# Altium footprint library Footprint_Vlad.PcbLib: 392 footprints (part 16 of 25)
Each footprint in its own frame and in the unit in brackets; x right, y up, seen from the top. Pads: shape width x height; smd on the part's side, far side on the other; paste and mask are expansions set on the pad; w line width, h text height; cw(c..) or ccw(c..) is an arc to the next point about the centre after c.
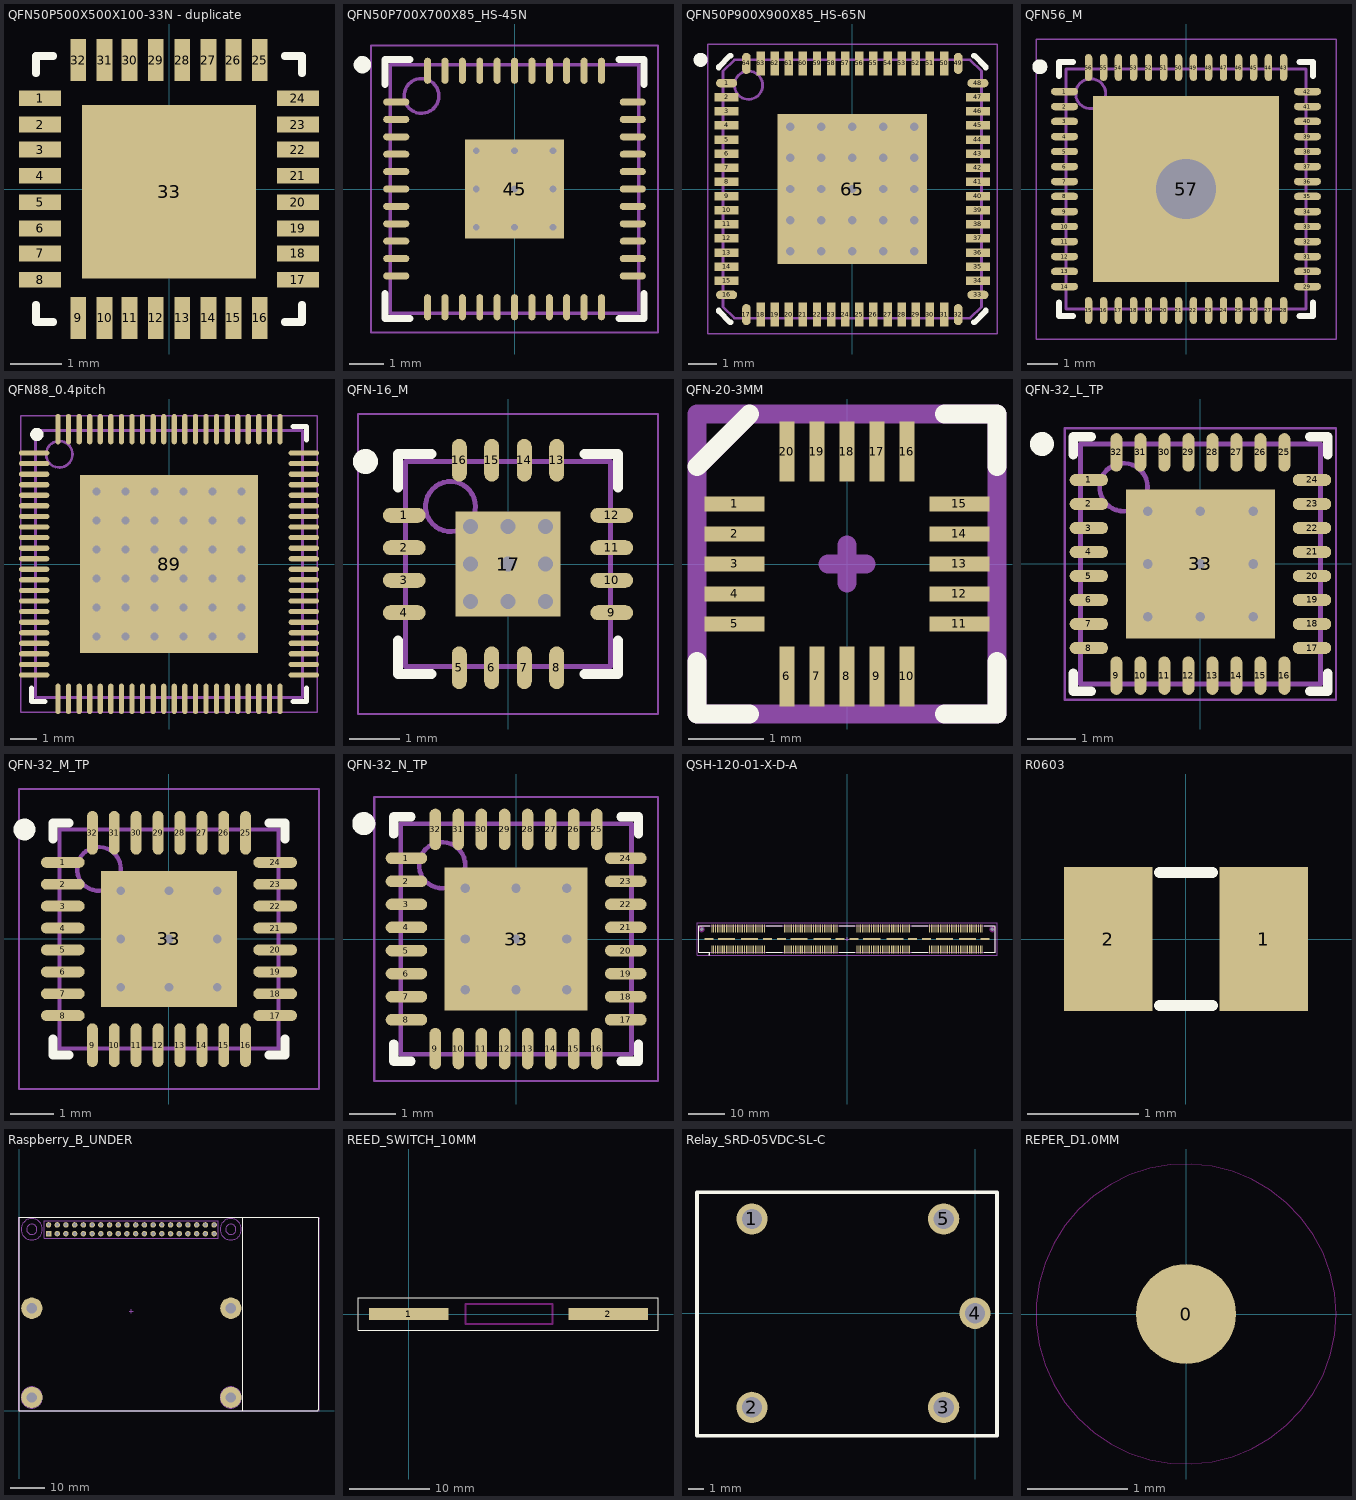
[diagram p15: the footprints below, top view; thin cyan lines are the x and y axes]

## QFN50P500X500X100-33N - duplicate [mil]
pads (33):
  rect 32x12 smd: 1(-98,69) 2(-98,49) 3(-98,30) 4(-98,10) 5(-98,-10) 6(-98,-30) 7(-98,-49) 8(-98,-69) 17(98,-69) 18(98,-49) 19(98,-30) 20(98,-10) 21(98,10) 22(98,30) 23(98,49) 24(98,69)
  rect 12x32 smd: 9(-69,-98) 10(-49,-98) 11(-30,-98) 12(-10,-98) 13(10,-98) 14(30,-98) 15(49,-98) 16(69,-98) 25(69,98) 26(49,98) 27(30,98) 28(10,98) 29(-10,98) 30(-30,98) 31(-49,98) 32(-69,98)
  rect 132x132 smd: 33(0,-2)
Top Overlay:
  lines w6: -101,-88 -101,-101 -88,-101 ; -101,88 -101,101 -88,101 ; 88,-101 101,-101 101,-88 ; 88,101 101,101 101,88

## QFN50P700X700X85_HS-45N [mm] "QFN, 44-Leads, Body 7,00x7,00mm, Pitch 0,50mm, Thermal Pad 2,85x2,85mm, IPC Medium Density"
height 0.85
pads (45):
  oval 0.75x0.2 smd: 1(-3.4,2.5) 2(-3.4,2) 3(-3.4,1.5) 4(-3.4,1) 5(-3.4,0.5) 6(-3.4,0) 7(-3.4,-0.5) 8(-3.4,-1) 9(-3.4,-1.5) 10(-3.4,-2) 11(-3.4,-2.5) 23(3.4,-2.5) 24(3.4,-2) 25(3.4,-1.5) 26(3.4,-1) 27(3.4,-0.5) 28(3.4,0) 29(3.4,0.5) 30(3.4,1) 31(3.4,1.5) 32(3.4,2) 33(3.4,2.5)
  oval 0.2x0.75 smd: 12(-2.5,-3.4) 13(-2,-3.4) 14(-1.5,-3.4) 15(-1,-3.4) 16(-0.5,-3.4) 17(0,-3.4) 18(0.5,-3.4) 19(1,-3.4) 20(1.5,-3.4) 21(2,-3.4) 22(2.5,-3.4) 34(2.5,3.4) 35(2,3.4) 36(1.5,3.4) 37(1,3.4) 38(0.5,3.4) 39(0,3.4) 40(-0.5,3.4) 41(-1,3.4) 42(-1.5,3.4) 43(-2,3.4) 44(-2.5,3.4)
  rect 2.85x2.85 smd: 45(0,0)
via 1.1,-1.1 diameter 0.5 hole 0.2
via 0,-1.1 diameter 0.5 hole 0.2
via -1.1,-1.1 diameter 0.5 hole 0.2
via 1.1,0 diameter 0.5 hole 0.2
via 0,0 diameter 0.5 hole 0.2
via -1.1,0 diameter 0.5 hole 0.2
via 1.1,1.1 diameter 0.5 hole 0.2
via 0,1.1 diameter 0.5 hole 0.2
via -1.1,1.1 diameter 0.5 hole 0.2
Top Overlay:
  circle w0.25: c-4.375,3.575 r0.125
  lines w0.2: -3.725,-3 -3.725,-3.725 -3,-3.725 ; -3.725,3 -3.725,3.725 -3,3.725 ; 3,-3.725 3.725,-3.725 3.725,-3 ; 3,3.725 3.725,3.725 3.725,3
Assembly Top:
  circle w0.1: c-2.675,2.675 r0.5
  lines w0.1: -3.575,-3.575 3.575,-3.575 3.575,3.575 -3.575,3.575 -3.575,-3.575
Courtyard Top:
  lines w0.05: -4.125,-4.125 4.125,-4.125 4.125,4.125 -4.125,4.125 -4.125,-4.125
  lines w0.1: -0.5,0 0.5,0 ; 0,-0.5 0,0.5
3D body "QFN50P700X700X85_HS-45N.step": height 0.85, standoff 0, extent -3.576,-3.576 3.576,3.576

## QFN50P900X900X85_HS-65N [mm] "QFN, 64-Leads, Body 9,00x9,00mm, Pitch 0,50mm, Thermal Pad 5,30x5,30mm, IPC Medium Density"
height 0.85
pads (65):
  oval 0.75x0.3 smd: 1(-4.45,3.75) 16(-4.45,-3.75) 33(4.45,-3.75) 48(4.45,3.75)
  rect 0.85x0.3 smd: 2(-4.45,3.25) 3(-4.45,2.75) 4(-4.45,2.25) 5(-4.45,1.75) 6(-4.45,1.25) 7(-4.45,0.75) 8(-4.45,0.25) 9(-4.45,-0.25) 10(-4.45,-0.75) 11(-4.45,-1.25) 12(-4.45,-1.75) 13(-4.45,-2.25) 14(-4.45,-2.75) 15(-4.45,-3.25) 34(4.45,-3.25) 35(4.45,-2.75) 36(4.45,-2.25) 37(4.45,-1.75) 38(4.45,-1.25) 39(4.45,-0.75) 40(4.45,-0.25) 41(4.45,0.25) 42(4.45,0.75) 43(4.45,1.25) 44(4.45,1.75) 45(4.45,2.25) 46(4.45,2.75) 47(4.45,3.25)
  oval 0.3x0.75 smd: 17(-3.75,-4.45) 32(3.75,-4.45) 49(3.75,4.45) 64(-3.75,4.45)
  rect 0.3x0.85 smd: 18(-3.25,-4.45) 19(-2.75,-4.45) 20(-2.25,-4.45) 21(-1.75,-4.45) 22(-1.25,-4.45) 23(-0.75,-4.45) 24(-0.25,-4.45) 25(0.25,-4.45) 26(0.75,-4.45) 27(1.25,-4.45) 28(1.75,-4.45) 29(2.25,-4.45) 30(2.75,-4.45) 31(3.25,-4.45) 50(3.25,4.45) 51(2.75,4.45) 52(2.25,4.45) 53(1.75,4.45) 54(1.25,4.45) 55(0.75,4.45) 56(0.25,4.45) 57(-0.25,4.45) 58(-0.75,4.45) 59(-1.25,4.45) 60(-1.75,4.45) 61(-2.25,4.45) 62(-2.75,4.45) 63(-3.25,4.45)
  rect 5.3x5.3 smd: 65(0,0)
via -2.2,2.2 diameter 0.5 hole 0.3
via -1.1,2.2 diameter 0.5 hole 0.3
via 0,2.2 diameter 0.5 hole 0.3
via 1.1,2.2 diameter 0.5 hole 0.3
via 2.2,2.2 diameter 0.5 hole 0.3
via -2.2,1.1 diameter 0.5 hole 0.3
via -1.1,1.1 diameter 0.5 hole 0.3
via 0,1.1 diameter 0.5 hole 0.3
via 1.1,1.1 diameter 0.5 hole 0.3
via 2.2,1.1 diameter 0.5 hole 0.3
via -2.2,0 diameter 0.5 hole 0.3
via -1.1,0 diameter 0.5 hole 0.3
via 0,0 diameter 0.5 hole 0.3
via 1.1,0 diameter 0.5 hole 0.3
via 2.2,0 diameter 0.5 hole 0.3
via -2.2,-1.1 diameter 0.5 hole 0.3
via -1.1,-1.1 diameter 0.5 hole 0.3
via 0,-1.1 diameter 0.5 hole 0.3
via 1.1,-1.1 diameter 0.5 hole 0.3
via 2.2,-1.1 diameter 0.5 hole 0.3
via -2.2,-2.2 diameter 0.5 hole 0.3
via -1.1,-2.2 diameter 0.5 hole 0.3
via 0,-2.2 diameter 0.5 hole 0.3
via 1.1,-2.2 diameter 0.5 hole 0.3
via 2.2,-2.2 diameter 0.5 hole 0.3
Top Overlay:
  circle w0.25: c-5.375,4.575 r0.125
  lines w0.2: -4.725,-4.3 -4.725,-4.325 -4.325,-4.725 -4.3,-4.725 ; -4.725,4.3 -4.725,4.325 -4.325,4.725 -4.3,4.725 ; 4.3,-4.725 4.325,-4.725 4.725,-4.325 4.725,-4.3 ; 4.3,4.725 4.325,4.725 4.725,4.325 4.725,4.3
Assembly Top:
  circle w0.1: c-3.675,3.675 r0.5
  lines w0.1: -4.575,-4.175 -4.175,-4.575 4.175,-4.575 4.575,-4.175 4.575,4.175 4.175,4.575 -4.175,4.575 -4.575,4.175 -4.575,-4.175
Courtyard Top:
  lines w0.05: -5.125,-5.125 -5.125,5.125 5.125,5.125 5.125,-5.125 -5.125,-5.125
  lines w0.1: -0.5,0 0.5,0 ; 0,-0.5 0,0.5
3D body "QFN50P900X900X85_HS-65N.step": height 0.85, standoff 0, extent -4.595,-4.595 4.595,4.595

## QFN56_M [mm] "QFN, 56-Leads, Body 8x8mm, Pitch 0.5mm, Thermal Pad 6.5x6.5mm, IPC Low Density"
height 0.9
pads (57):
  oval 0.9x0.25 smd: 1(-4.05,3.25) 2(-4.05,2.75) 3(-4.05,2.25) 4(-4.05,1.75) 5(-4.05,1.25) 6(-4.05,0.75) 7(-4.05,0.25) 8(-4.05,-0.25) 9(-4.05,-0.75) 10(-4.05,-1.25) 11(-4.05,-1.75) 12(-4.05,-2.25) 13(-4.05,-2.75) 14(-4.05,-3.25) 29(4.05,-3.25) 30(4.05,-2.75) 31(4.05,-2.25) 32(4.05,-1.75) 33(4.05,-1.25) 34(4.05,-0.75) 35(4.05,-0.25) 36(4.05,0.25) 37(4.05,0.75) 38(4.05,1.25) 39(4.05,1.75) 40(4.05,2.25) 41(4.05,2.75) 42(4.05,3.25)
  oval 0.25x0.9 smd: 15(-3.25,-4.05) 16(-2.75,-4.05) 17(-2.25,-4.05) 18(-1.75,-4.05) 19(-1.25,-4.05) 20(-0.75,-4.05) 21(-0.25,-4.05) 22(0.25,-4.05) 23(0.75,-4.05) 24(1.25,-4.05) 25(1.75,-4.05) 26(2.25,-4.05) 27(2.75,-4.05) 28(3.25,-4.05) 43(3.25,4.05) 44(2.75,4.05) 45(2.25,4.05) 46(1.75,4.05) 47(1.25,4.05) 48(0.75,4.05) 49(0.25,4.05) 50(-0.25,4.05) 51(-0.75,4.05) 52(-1.25,4.05) 53(-1.75,4.05) 54(-2.25,4.05) 55(-2.75,4.05) 56(-3.25,4.05)
  rect 6.2x6.2 smd: 57(0,0)
via 0,0 diameter 3 hole 2
Top Overlay:
  circle w0.25: c-4.875,4.075 r0.125
  lines w0.2: -4.225,-3.775 -4.225,-4.225 -3.775,-4.225 ; -4.225,3.775 -4.225,4.225 -3.775,4.225 ; 3.775,-4.225 4.225,-4.225 4.225,-3.775 ; 3.775,4.225 4.225,4.225 4.225,3.775
Mechanical 13:
  circle w0.1: c-3.175,3.175 r0.5
  lines w0.1: -4,-4 4,-4 4,4 -4,4 -4,-4
Mechanical 15:
  lines w0.05: -5,-5 5,-5 5,5 -5,5 -5,-5
  lines w0.1: -0.5,0 0.5,0 ; 0,-0.5 0,0.5
3D body: height 0.9, standoff 0, extent -4.003,-4.003 4.003,4.003

## QFN88_0.4pitch [mm] "QFN, 88-Leads, Body 10,00x10,00mm, Pitch 0,40mm, Thermal Pad 6,74x6,74mm, IPC Medium Density"
height 0.9
pads (89):
  oval 1.15x0.2 smd: 1(-5.1,4.2) 2(-5.1,3.8) 3(-5.1,3.4) 4(-5.1,3) 5(-5.1,2.6) 6(-5.1,2.2) 7(-5.1,1.8) 8(-5.1,1.4) 9(-5.1,1) 10(-5.1,0.6) 11(-5.1,0.2) 12(-5.1,-0.2) 13(-5.1,-0.6) 14(-5.1,-1) 15(-5.1,-1.4) 16(-5.1,-1.8) 17(-5.1,-2.2) 18(-5.1,-2.6) 19(-5.1,-3) 20(-5.1,-3.4) 21(-5.1,-3.8) 22(-5.1,-4.2) 45(5.1,-4.2) 46(5.1,-3.8) 47(5.1,-3.4) 48(5.1,-3) 49(5.1,-2.6) 50(5.1,-2.2) 51(5.1,-1.8) 52(5.1,-1.4) 53(5.1,-1) 54(5.1,-0.6) 55(5.1,-0.2) 56(5.1,0.2) 57(5.1,0.6) 58(5.1,1) 59(5.1,1.4) 60(5.1,1.8) 61(5.1,2.2) 62(5.1,2.6) 63(5.1,3) 64(5.1,3.4) 65(5.1,3.8) 66(5.1,4.2)
  oval 0.2x1.15 smd: 23(-4.2,-5.1) 24(-3.8,-5.1) 25(-3.4,-5.1) 26(-3,-5.1) 27(-2.6,-5.1) 28(-2.2,-5.1) 29(-1.8,-5.1) 30(-1.4,-5.1) 31(-1,-5.1) 32(-0.6,-5.1) 33(-0.2,-5.1) 34(0.2,-5.1) 35(0.6,-5.1) 36(1,-5.1) 37(1.4,-5.1) 38(1.8,-5.1) 39(2.2,-5.1) 40(2.6,-5.1) 41(3,-5.1) 42(3.4,-5.1) 43(3.8,-5.1) 44(4.2,-5.1) 67(4.2,5.1) 68(3.8,5.1) 69(3.4,5.1) 70(3,5.1) 71(2.6,5.1) 72(2.2,5.1) 73(1.8,5.1) 74(1.4,5.1) 75(1,5.1) 76(0.6,5.1) 77(0.2,5.1) 78(-0.2,5.1) 79(-0.6,5.1) 80(-1,5.1) 81(-1.4,5.1) 82(-1.8,5.1) 83(-2.2,5.1) 84(-2.6,5.1) 85(-3,5.1) 86(-3.4,5.1) 87(-3.8,5.1) 88(-4.2,5.1)
  rect 6.74x6.74 smd: 89(0,0)
via 2.75,-2.75 diameter 0.6 hole 0.3
via 1.65,-2.75 diameter 0.6 hole 0.3
via 0.55,-2.75 diameter 0.6 hole 0.3
via -0.55,-2.75 diameter 0.6 hole 0.3
via -1.65,-2.75 diameter 0.6 hole 0.3
via -2.75,-2.75 diameter 0.6 hole 0.3
via 2.75,-1.65 diameter 0.6 hole 0.3
via 1.65,-1.65 diameter 0.6 hole 0.3
via 0.55,-1.65 diameter 0.6 hole 0.3
via -0.55,-1.65 diameter 0.6 hole 0.3
via -1.65,-1.65 diameter 0.6 hole 0.3
via -2.75,-1.65 diameter 0.6 hole 0.3
via 2.75,-0.55 diameter 0.6 hole 0.3
via 1.65,-0.55 diameter 0.6 hole 0.3
via 0.55,-0.55 diameter 0.6 hole 0.3
via -0.55,-0.55 diameter 0.6 hole 0.3
via -1.65,-0.55 diameter 0.6 hole 0.3
via -2.75,-0.55 diameter 0.6 hole 0.3
via 2.75,0.55 diameter 0.6 hole 0.3
via 1.65,0.55 diameter 0.6 hole 0.3
via 0.55,0.55 diameter 0.6 hole 0.3
via -0.55,0.55 diameter 0.6 hole 0.3
via -1.65,0.55 diameter 0.6 hole 0.3
via -2.75,0.55 diameter 0.6 hole 0.3
via 2.75,1.65 diameter 0.6 hole 0.3
via 1.65,1.65 diameter 0.6 hole 0.3
via 0.55,1.65 diameter 0.6 hole 0.3
via -0.55,1.65 diameter 0.6 hole 0.3
via -1.65,1.65 diameter 0.6 hole 0.3
via -2.75,1.65 diameter 0.6 hole 0.3
via 2.75,2.75 diameter 0.6 hole 0.3
via 1.65,2.75 diameter 0.6 hole 0.3
via 0.55,2.75 diameter 0.6 hole 0.3
via -0.55,2.75 diameter 0.6 hole 0.3
via -1.65,2.75 diameter 0.6 hole 0.3
via -2.75,2.75 diameter 0.6 hole 0.3
Top Overlay:
  circle w0.25: c-5,4.9 r0.125
  lines w0.2: -5.2,-4.7 -5.2,-5.2 -4.7,-5.2 ; 4.7,-5.2 5.2,-5.2 5.2,-4.7 ; 4.7,5.2 5.2,5.2 5.2,4.7
Mechanical 1:
  circle w0.1: c-4.15,4.15 r0.5
  lines w0.1: -5.05,-5.05 5.05,-5.05 5.05,5.05 -5.05,5.05 -5.05,-5.05
Mechanical 15:
  lines w0.05: -5.6,-5.6 5.6,-5.6 5.6,5.6 -5.6,5.6 -5.6,-5.6
3D body: height 0.9, standoff 0.02, extent -5.05,-5.05 5.05,5.05

## QFN-16_M [mm] "QFN, 16-Leads, Body 4x4mm, Pitch 0.65mm, Thermal Pad 2.1x2.1mm, IPC Low Density"
height 0.8
pads (17):
  oval 0.85x0.3 smd: 1(-2.075,0.975) 2(-2.075,0.325) 3(-2.075,-0.325) 4(-2.075,-0.975) 9(2.075,-0.975) 10(2.075,-0.325) 11(2.075,0.325) 12(2.075,0.975)
  oval 0.3x0.85 smd: 5(-0.975,-2.075) 6(-0.325,-2.075) 7(0.325,-2.075) 8(0.975,-2.075) 13(0.975,2.075) 14(0.325,2.075) 15(-0.325,2.075) 16(-0.975,2.075)
  rect 2.1x2.1 smd paste-1.05: 17(0,0)
via 0.75,-0.75 diameter 0.6 hole 0.3
via -0.75,-0.75 diameter 0.6 hole 0.3
via -0.75,0.75 diameter 0.6 hole 0.3
via 0.75,0.75 diameter 0.6 hole 0.3
via 0,0 diameter 0.6 hole 0.3
via 0.75,0 diameter 0.6 hole 0.3
via -0.75,0 diameter 0.6 hole 0.3
via 0,0.75 diameter 0.6 hole 0.3
via 0,-0.75 diameter 0.6 hole 0.3
Top Overlay:
  circle w0.25: c-2.85,2.05 r0.125
  lines w0.2: -2.2,-1.525 -2.2,-2.2 -1.525,-2.2 ; -2.2,1.525 -2.2,2.2 -1.525,2.2 ; 1.525,-2.2 2.2,-2.2 2.2,-1.525 ; 1.525,2.2 2.2,2.2 2.2,1.525
Top Paste:
  rectangle: -0.95,-0.95 0.95,0.95
Mechanical 13:
  circle w0.1: c-1.15,1.15 r0.5
  lines w0.1: -2.05,-2.05 2.05,-2.05 2.05,2.05 -2.05,2.05 -2.05,-2.05
Mechanical 15:
  lines w0.05: -3,-3 3,-3 3,3 -3,3 -3,-3
  lines w0.1: -0.5,0 0.5,0 ; 0,-0.5 0,0.5
3D body: height 0.8, standoff 0, extent -2.05,-2.05 2.05,2.05

## QFN-20-3MM [mm]
pads (20):
  rect 0.8x0.2 smd: 1(-1.499,0.801) 2(-1.499,0.401) 3(-1.499,0.001) 4(-1.499,-0.399) 5(-1.499,-0.799) 11(1.499,-0.799) 12(1.499,-0.399) 13(1.499,0.001) 14(1.499,0.401) 15(1.499,0.801)
  rect 0.2x0.8 smd: 6(-0.801,-1.499) 7(-0.401,-1.499) 8(-0.001,-1.499) 9(0.399,-1.499) 10(0.799,-1.499) 16(0.799,1.499) 17(0.399,1.499) 18(-0.001,1.499) 19(-0.401,1.499) 20(-0.801,1.499)
Top Overlay:
  lines w0.254: -2,-1.3 -2,-2 -1.3,-2 ; -2,1.3 -1.3,2 ; 1.3,-2 2,-2 2,-1.3 ; 1.3,2 2,2 2,1.3
Mechanical 15:
  lines w0.254: -2.001,1.3 -2,1.3 -1.3,2 ; -0.254,0 0.254,0 ; 0,-0.254 0,0.254 ; -2.001,-2 1.999,-2 1.999,2 -2.001,2 -2.001,-2
  text ".Designator" at -2,2.5 h1.52
3D body "User Library-QFN-20-2.step": height 0.75, standoff 0, extent -1.511,-1.509 1.509,1.511

## QFN-32_L_TP [mm]
height 1
pads (33):
  oval 0.8x0.25 smd: 1(-2.325,1.75) 2(-2.325,1.25) 3(-2.325,0.75) 4(-2.325,0.25) 5(-2.325,-0.25) 6(-2.325,-0.75) 7(-2.325,-1.25) 8(-2.325,-1.75) 17(2.325,-1.75) 18(2.325,-1.25) 19(2.325,-0.75) 20(2.325,-0.25) 21(2.325,0.25) 22(2.325,0.75) 23(2.325,1.25) 24(2.325,1.75)
  oval 0.25x0.8 smd: 9(-1.75,-2.325) 10(-1.25,-2.325) 11(-0.75,-2.325) 12(-0.25,-2.325) 13(0.25,-2.325) 14(0.75,-2.325) 15(1.25,-2.325) 16(1.75,-2.325) 25(1.75,2.325) 26(1.25,2.325) 27(0.75,2.325) 28(0.25,2.325) 29(-0.25,2.325) 30(-0.75,2.325) 31(-1.25,2.325) 32(-1.75,2.325)
  rect 3.1x3.1 smd: 33(0,0)
via 1.1,-1.1 diameter 0.5 hole 0.2
via 0,-1.1 diameter 0.5 hole 0.2
via -1.1,-1.1 diameter 0.5 hole 0.2
via 1.1,0 diameter 0.5 hole 0.2
via 0,0 diameter 0.5 hole 0.2
via -1.1,0 diameter 0.5 hole 0.2
via 1.1,1.1 diameter 0.5 hole 0.2
via 0,1.1 diameter 0.5 hole 0.2
via -1.1,1.1 diameter 0.5 hole 0.2
Top Overlay:
  circle w0.25: c-3.3,2.5 r0.125
  lines w0.2: -2.65,-2.275 -2.65,-2.65 -2.275,-2.65 ; -2.65,2.275 -2.65,2.65 -2.275,2.65 ; 2.275,-2.65 2.65,-2.65 2.65,-2.275 ; 2.275,2.65 2.65,2.65 2.65,2.275
Assembly Top:
  circle w0.1: c-1.6,1.6 r0.5
  lines w0.1: -2.5,-2.5 2.5,-2.5 2.5,2.5 -2.5,2.5 -2.5,-2.5
Courtyard Top:
  lines w0.05: -2.825,-2.825 2.825,-2.825 2.825,2.825 -2.825,2.825 -2.825,-2.825
  lines w0.1: -0.5,0 0.5,0 ; 0,-0.5 0,0.5
3D body "QFN-32_L_TP.step": height 1, standoff 0, extent -2.51,-2.51 2.51,2.51

## QFN-32_M_TP [mm]
height 1
pads (33):
  oval 1x0.25 smd: 1(-2.425,1.75) 2(-2.425,1.25) 3(-2.425,0.75) 4(-2.425,0.25) 5(-2.425,-0.25) 6(-2.425,-0.75) 7(-2.425,-1.25) 8(-2.425,-1.75) 17(2.425,-1.75) 18(2.425,-1.25) 19(2.425,-0.75) 20(2.425,-0.25) 21(2.425,0.25) 22(2.425,0.75) 23(2.425,1.25) 24(2.425,1.75)
  oval 0.25x1 smd: 9(-1.75,-2.425) 10(-1.25,-2.425) 11(-0.75,-2.425) 12(-0.25,-2.425) 13(0.25,-2.425) 14(0.75,-2.425) 15(1.25,-2.425) 16(1.75,-2.425) 25(1.75,2.425) 26(1.25,2.425) 27(0.75,2.425) 28(0.25,2.425) 29(-0.25,2.425) 30(-0.75,2.425) 31(-1.25,2.425) 32(-1.75,2.425)
  rect 3.1x3.1 smd: 33(0,0)
via 1.1,-1.1 diameter 0.5 hole 0.2
via 0,-1.1 diameter 0.5 hole 0.2
via -1.1,-1.1 diameter 0.5 hole 0.2
via 1.1,0 diameter 0.5 hole 0.2
via 0,0 diameter 0.5 hole 0.2
via -1.1,0 diameter 0.5 hole 0.2
via 1.1,1.1 diameter 0.5 hole 0.2
via 0,1.1 diameter 0.5 hole 0.2
via -1.1,1.1 diameter 0.5 hole 0.2
Top Overlay:
  circle w0.25: c-3.3,2.5 r0.125
  lines w0.2: -2.65,-2.275 -2.65,-2.65 -2.275,-2.65 ; -2.65,2.275 -2.65,2.65 -2.275,2.65 ; 2.275,-2.65 2.65,-2.65 2.65,-2.275 ; 2.275,2.65 2.65,2.65 2.65,2.275
Assembly Top:
  circle w0.1: c-1.6,1.6 r0.5
  lines w0.1: -2.5,-2.5 2.5,-2.5 2.5,2.5 -2.5,2.5 -2.5,-2.5
Courtyard Top:
  lines w0.05: -3.425,-3.425 3.425,-3.425 3.425,3.425 -3.425,3.425 -3.425,-3.425
  lines w0.1: -0.5,0 0.5,0 ; 0,-0.5 0,0.5
3D body "QFN32_M_TP.step": height 1, standoff 0, extent -2.51,-2.51 2.51,2.51

## QFN-32_N_TP [mm]
height 1
pads (33):
  oval 0.9x0.25 smd: 1(-2.375,1.75) 2(-2.375,1.25) 3(-2.375,0.75) 4(-2.375,0.25) 5(-2.375,-0.25) 6(-2.375,-0.75) 7(-2.375,-1.25) 8(-2.375,-1.75) 17(2.375,-1.75) 18(2.375,-1.25) 19(2.375,-0.75) 20(2.375,-0.25) 21(2.375,0.25) 22(2.375,0.75) 23(2.375,1.25) 24(2.375,1.75)
  oval 0.25x0.9 smd: 9(-1.75,-2.375) 10(-1.25,-2.375) 11(-0.75,-2.375) 12(-0.25,-2.375) 13(0.25,-2.375) 14(0.75,-2.375) 15(1.25,-2.375) 16(1.75,-2.375) 25(1.75,2.375) 26(1.25,2.375) 27(0.75,2.375) 28(0.25,2.375) 29(-0.25,2.375) 30(-0.75,2.375) 31(-1.25,2.375) 32(-1.75,2.375)
  rect 3.1x3.1 smd: 33(0,0)
via 1.1,-1.1 diameter 0.5 hole 0.2
via 0,-1.1 diameter 0.5 hole 0.2
via -1.1,-1.1 diameter 0.5 hole 0.2
via 1.1,0 diameter 0.5 hole 0.2
via 0,0 diameter 0.5 hole 0.2
via -1.1,0 diameter 0.5 hole 0.2
via 1.1,1.1 diameter 0.5 hole 0.2
via 0,1.1 diameter 0.5 hole 0.2
via -1.1,1.1 diameter 0.5 hole 0.2
Top Overlay:
  circle w0.25: c-3.3,2.5 r0.125
  lines w0.2: -2.65,-2.275 -2.65,-2.65 -2.275,-2.65 ; -2.65,2.275 -2.65,2.65 -2.275,2.65 ; 2.275,-2.65 2.65,-2.65 2.65,-2.275 ; 2.275,2.65 2.65,2.65 2.65,2.275
Assembly Top:
  circle w0.1: c-1.6,1.6 r0.5
  lines w0.1: -2.5,-2.5 2.5,-2.5 2.5,2.5 -2.5,2.5 -2.5,-2.5
Courtyard Top:
  lines w0.05: -3.075,-3.075 3.075,-3.075 3.075,3.075 -3.075,3.075 -3.075,-3.075
  lines w0.1: -0.5,0 0.5,0 ; 0,-0.5 0,0.5
3D body "QFN-32N_Tp.step": height 1, standoff 0, extent -2.51,-2.51 2.51,2.51

## QSH-120-01-X-D-A [mm] "0.50mm pitch, 240 pin, high speed socket strip"
height 3.25
pads (258):
  rect 0.28x2.27 smd mask+0: 1(-37.25,-2.87) 2(-37.25,2.87) 3(-36.75,-2.87) 4(-36.75,2.87) 5(-36.25,-2.87) 6(-36.25,2.87) 7(-35.75,-2.87) 8(-35.75,2.87) 9(-35.25,-2.87) 10(-35.25,2.87) 11(-34.75,-2.87) 12(-34.75,2.87) 13(-34.25,-2.87) 14(-34.25,2.87) 15(-33.75,-2.87) 16(-33.75,2.87) 17(-33.25,-2.87) 18(-33.25,2.87) 19(-32.75,-2.87) 20(-32.75,2.87) 21(-32.25,-2.87) 22(-32.25,2.87) 23(-31.75,-2.87) 24(-31.75,2.87) 25(-31.25,-2.87) 26(-31.25,2.87) 27(-30.75,-2.87) 28(-30.75,2.87) 29(-30.25,-2.87) 30(-30.25,2.87) 31(-29.75,-2.87) 32(-29.75,2.87) 33(-29.25,-2.87) 34(-29.25,2.87) 35(-28.75,-2.87) 36(-28.75,2.87) 37(-28.25,-2.87) 38(-28.25,2.87) 39(-27.75,-2.87) 40(-27.75,2.87) 41(-27.25,-2.87) 42(-27.25,2.87) 43(-26.75,-2.87) 44(-26.75,2.87) 45(-26.25,-2.87) 46(-26.25,2.87) 47(-25.75,-2.87) 48(-25.75,2.87) 49(-25.25,-2.87) 50(-25.25,2.87) 51(-24.75,-2.87) 52(-24.75,2.87) 53(-24.25,-2.87) 54(-24.25,2.87) 55(-23.75,-2.87) 56(-23.75,2.87) 57(-23.25,-2.87) 58(-23.25,2.87) 59(-22.75,-2.87) 60(-22.75,2.87) 61(-17.25,-2.87) 62(-17.25,2.87) 63(-16.75,-2.87) 64(-16.75,2.87) 65(-16.25,-2.87) 66(-16.25,2.87) 67(-15.75,-2.87) 68(-15.75,2.87) 69(-15.25,-2.87) 70(-15.25,2.87) 71(-14.75,-2.87) 72(-14.75,2.87) 73(-14.25,-2.87) 74(-14.25,2.87) 75(-13.75,-2.87) 76(-13.75,2.87) 77(-13.25,-2.87) 78(-13.25,2.87) 79(-12.75,-2.87) 80(-12.75,2.87) 81(-12.25,-2.87) 82(-12.25,2.87) 83(-11.75,-2.87) 84(-11.75,2.87) 85(-11.25,-2.87) 86(-11.25,2.87) 87(-10.75,-2.87) 88(-10.75,2.87) 89(-10.25,-2.87) 90(-10.25,2.87) 91(-9.75,-2.87) 92(-9.75,2.87) 93(-9.25,-2.87) 94(-9.25,2.87) 95(-8.75,-2.87) 96(-8.75,2.87) 97(-8.25,-2.87) 98(-8.25,2.87) 99(-7.75,-2.87) 100(-7.75,2.87) 101(-7.25,-2.87) 102(-7.25,2.87) 103(-6.75,-2.87) 104(-6.75,2.87) 105(-6.25,-2.87) 106(-6.25,2.87) 107(-5.75,-2.87) 108(-5.75,2.87) 109(-5.25,-2.87) 110(-5.25,2.87) 111(-4.75,-2.87) 112(-4.75,2.87) 113(-4.25,-2.87) 114(-4.25,2.87) 115(-3.75,-2.87) 116(-3.75,2.87) 117(-3.25,-2.87) 118(-3.25,2.87) 119(-2.75,-2.87) 120(-2.75,2.87) 121(2.75,-2.87) 122(2.75,2.87) 123(3.25,-2.87) 124(3.25,2.87) 125(3.75,-2.87) 126(3.75,2.87) 127(4.25,-2.87) 128(4.25,2.87) 129(4.75,-2.87) 130(4.75,2.87) 131(5.25,-2.87) 132(5.25,2.87) 133(5.75,-2.87) 134(5.75,2.87) 135(6.25,-2.87) 136(6.25,2.87) 137(6.75,-2.87) 138(6.75,2.87) 139(7.25,-2.87) 140(7.25,2.87) 141(7.75,-2.87) 142(7.75,2.87) 143(8.25,-2.87) 144(8.25,2.87) 145(8.75,-2.87) 146(8.75,2.87) 147(9.25,-2.87) 148(9.25,2.87) 149(9.75,-2.87) 150(9.75,2.87) 151(10.25,-2.87) 152(10.25,2.87) 153(10.75,-2.87) 154(10.75,2.87) 155(11.25,-2.87) 156(11.25,2.87) 157(11.75,-2.87) 158(11.75,2.87) 159(12.25,-2.87) 160(12.25,2.87) 161(12.75,-2.87) 162(12.75,2.87) 163(13.25,-2.87) 164(13.25,2.87) 165(13.75,-2.87) 166(13.75,2.87) 167(14.25,-2.87) 168(14.25,2.87) 169(14.75,-2.87) 170(14.75,2.87) 171(15.25,-2.87) 172(15.25,2.87) 173(15.75,-2.87) 174(15.75,2.87) 175(16.25,-2.87) 176(16.25,2.87) 177(16.75,-2.87) 178(16.75,2.87) 179(17.25,-2.87) 180(17.25,2.87) 181(22.75,-2.87) 182(22.75,2.87) 183(23.25,-2.87) 184(23.25,2.87) 185(23.75,-2.87) 186(23.75,2.87) 187(24.25,-2.87) 188(24.25,2.87) 189(24.75,-2.87) 190(24.75,2.87) 191(25.25,-2.87) 192(25.25,2.87) 193(25.75,-2.87) 194(25.75,2.87) 195(26.25,-2.87) 196(26.25,2.87) 197(26.75,-2.87) 198(26.75,2.87) 199(27.25,-2.87) 200(27.25,2.87) 201(27.75,-2.87) 202(27.75,2.87) 203(28.25,-2.87) 204(28.25,2.87) 205(28.75,-2.87) 206(28.75,2.87) 207(29.25,-2.87) 208(29.25,2.87) 209(29.75,-2.87) 210(29.75,2.87) 211(30.25,-2.87) 212(30.25,2.87) 213(30.75,-2.87) 214(30.75,2.87) 215(31.25,-2.87) 216(31.25,2.87) 217(31.75,-2.87) 218(31.75,2.87) 219(32.25,-2.87) 220(32.25,2.87) 221(32.75,-2.87) 222(32.75,2.87) 223(33.25,-2.87) 224(33.25,2.87) 225(33.75,-2.87) 226(33.75,2.87) 227(34.25,-2.87) 228(34.25,2.87) 229(34.75,-2.87) 230(34.75,2.87) 231(35.25,-2.87) 232(35.25,2.87) 233(35.75,-2.87) 234(35.75,2.87) 235(36.25,-2.87) 236(36.25,2.87) 237(36.75,-2.87) 238(36.75,2.87) 239(37.25,-2.87) 240(37.25,2.87)
  rect 2.54x0.43 smd mask+0: 241(-38.065,0) 244(-21.935,0) 245(-18.065,0) 248(-1.935,0) 249(1.935,0) 252(18.065,0) 253(21.935,0) 256(38.065,0)
  rect 4.7x0.43 smd mask+0: 242(-33.175,0) 243(-26.825,0) 246(-13.175,0) 247(-6.825,0) 250(6.825,0) 251(13.175,0) 254(26.825,0) 255(33.175,0)
  round 0.5 hole 1 unplated mask+0: 257(-40.065,2.67) 258(40.065,2.67)
Top Overlay:
  circle w0.25: c-37.95,-4.25 r0.125
  lines w0.2: -37.8,-3.6 -40.85,-3.6 -40.85,3.6 -37.8,3.6 ; -22.2,-3.6 -17.8,-3.6 ; -22.2,3.6 -17.8,3.6 ; -2.2,-3.6 2.2,-3.6 ; -2.2,3.6 2.2,3.6 ; 17.8,-3.6 22.2,-3.6 ; 17.8,3.6 22.2,3.6 ; 37.8,-3.6 40.85,-3.6 40.85,3.6 37.8,3.6
Keep-Out Layer:
  pour cut-out: -39.258,2.67 -39.286,2.879 -39.366,3.073 -39.494,3.241 -39.662,3.369 -39.856,3.449 -40.065,3.477 -40.274,3.449 -40.468,3.369 -40.636,3.241 -40.764,3.073 -40.844,2.879 -40.872,2.67 -40.844,2.461 -40.764,2.267 -40.636,2.099 -40.468,1.971 -40.274,1.891 -40.065,1.863 -39.856,1.891 -39.662,1.971 -39.494,2.099 -39.366,2.267 -39.286,2.461
  pour cut-out: 40.872,2.67 40.844,2.879 40.764,3.073 40.636,3.241 40.468,3.369 40.274,3.449 40.065,3.477 39.856,3.449 39.662,3.369 39.494,3.241 39.366,3.073 39.286,2.879 39.258,2.67 39.286,2.461 39.366,2.267 39.494,2.099 39.662,1.971 39.856,1.891 40.065,1.863 40.274,1.891 40.468,1.971 40.636,2.099 40.764,2.267 40.844,2.461
Mechanical 12:
  lines w0.001: -40.85,-3.6 40.85,-3.6 40.85,3 40.25,3.6 -40.25,3.6 -40.85,3 -40.85,-3.6
Mechanical 13:
  lines w0.1: -40.85,-3.6 40.85,-3.6 40.85,3 40.25,3.6 -40.25,3.6 -40.85,3 -40.85,-3.6
  text ".Designator" at 0.254,0.127 h1.52
Mechanical 15:
  lines w0.05: -0.5,0 0.5,0 ; 0,-0.5 0,0.5 ; -41.35,-4.5 41.35,-4.5 41.35,4.5 -41.35,4.5 -41.35,-4.5
3D body "QSH-120-01-L-D-A.stp": height 3.25, standoff -0.75, extent -40.691,-3.747 40.691,3.747

## R0603 [mm]
pads (2):
  rect 0.8x1.3 smd: 1(0.7,0) 2(-0.7,0)
Top Overlay:
  lines w0.1: -0.24,-0.6 0.24,-0.6 ; -0.24,0.6 0.24,0.6

## Raspberry_B_UNDER [mm]
pads (44):
  rect 1.6x1.6 hole 1: 1(8.57,51.595)
  round 1.6 hole 1: 2(8.57,54.135) 3(11.11,51.595) 4(11.11,54.135) 5(13.65,51.595) 6(13.65,54.135) 7(16.19,51.595) 8(16.19,54.135) 9(18.73,51.595) 10(18.73,54.135) 11(21.27,51.595) 12(21.27,54.135) 13(23.81,51.595) 14(23.81,54.135) 15(26.35,51.595) 16(26.35,54.135) 17(28.89,51.595) 18(28.89,54.135) 19(31.43,51.595) 20(31.43,54.135) 21(33.97,51.595) 22(33.97,54.135) 23(36.51,51.595) 24(36.51,54.135) 25(39.05,51.595) 26(39.05,54.135) 27(41.59,51.595) 28(41.59,54.135) 29(44.13,51.595) 30(44.13,54.135) 31(46.67,51.595) 32(46.67,54.135) 33(49.21,51.595) 34(49.21,54.135) 35(51.75,51.595) 36(51.75,54.135) 37(54.29,51.595) 38(54.29,54.135) 39(56.83,51.595) 40(56.83,54.135)
  round 6.2 hole 3 unplated: SHIELD(3.7,3.865) SHIELD(3.7,29.865) SHIELD(61.7,3.865) SHIELD(61.7,29.865)
Top Overlay:
  lines w0.254: -0.027,-0.003 65.226,-0.003 65.226,56.359 -0.027,56.359 ; -0.027,-0.003 -0.027,56.359 ; -0.027,-0.003 86.973,-0.003 87.373,0.397 87.373,55.997 87.01,56.359 -0.027,56.359
Mechanical 3:
  circle w0.1: c3.7,3.865 r3.1
  circle w0.1: c3.7,3.865 r1.5
  circle w0.1: c3.7,52.865 r1.5
  circle w0.1: c3.7,52.865 r3.1
  circle w0.1: c61.7,52.865 r1.5
  circle w0.1: c61.7,52.865 r3.1
  circle w0.1: c61.7,3.865 r1.5
  circle w0.1: c61.7,3.865 r3.1
  lines w0.1: 7.3,50.3 7.3,55.4 58.1,55.4 58.1,50.3 7.3,50.3
  lines w0.254: 0,0 87.4,0 87.4,56.4 0,56.4 0,0
Mechanical 13:
  lines w0.2: -0.034,-0.029 -0.034,56.359 65.226,56.359 65.226,-0.029 -0.034,-0.029
  text ".Designator" at 28.23,48.101 h1.52
Mechanical 15:
  lines w0.2: 32.046,29.014 33.316,29.014 ; 32.681,28.34 32.681,29.61
3D body "User Library-PBD2_54-40.STEP": height 2.2, standoff -8.9, extent 7.307,50.325 58.107,55.405
3D body "STEP_raspberrypi_b_+_(assembly).STEP": height 4.08, standoff -14.85, extent -0.034,0.046 87.378,56.359

## REED_SWITCH_10MM [mm]
pads (2):
  rect 10x1.5 smd: 1(0,0) 2(25,0)
Top Overlay:
  lines w0.1: -6.35,-2.032 -6.35,2.032 31.242,2.032 31.242,-2.032 -6.35,-2.032
Keep-Out Layer:
  lines w0.254: 7.112,-1.27 7.112,1.27 18.034,1.27 18.034,-1.27 7.112,-1.27

## Relay_SRD-05VDC-SL-C [mm]
pads (5):
  round 2 hole 1.3: 1(-14.2,6) 2(-14.2,-6) 3(-2,-6) 4(0,0) 5(-2,6)
Top Overlay:
  lines w0.25: -17.7,-7.8 -17.7,7.7 1.4,7.7 1.4,-7.8 -17.7,-7.8
3D body "User Library-relay_songle.STEP": height 15.6, standoff -4.7, extent -17.707,-7.788 1.393,7.712

## REPER_D1.0MM [mm]
pads (1):
  round 1 smd paste-99 mask+1: 0(0,0)
Top Layer keep-out:
  circle w0.01: c0,0 r1.5